# Altium footprint library Header2.PcbLib: 108 footprints (part 6 of 7)
Each footprint in its own frame and in the unit in brackets; x right, y up, seen from the top. Pads: shape width x height; smd on the part's side, far side on the other; paste and mask are expansions set on the pad; w line width, h text height; cw(c..) or ccw(c..) is an arc to the next point about the centre after c.
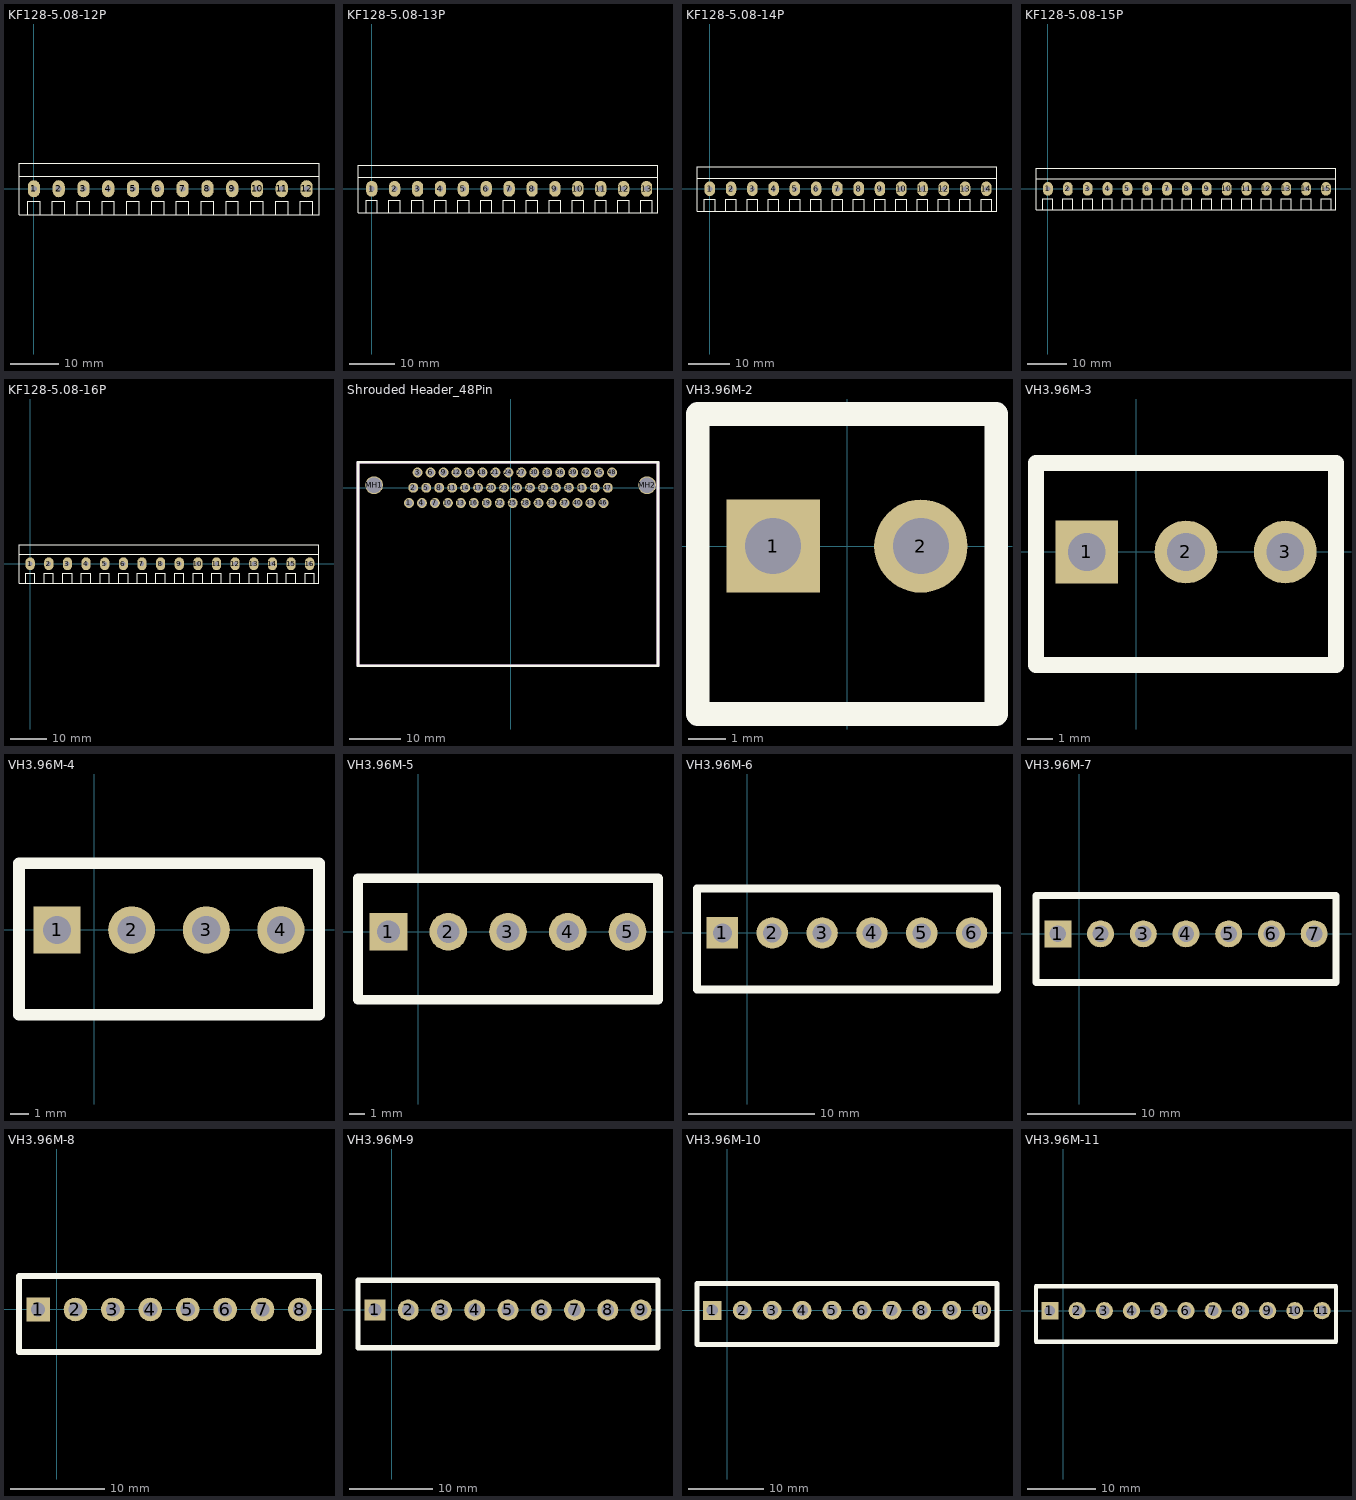
[diagram p5: the footprints below, top view; thin cyan lines are the x and y axes]

## KF128-5.08-12P [mm] "ÂÝ¶¤Ê½½ÓÏß¶Ë×Ó£¬½Å¾à5.08mm"
pads (12):
  oval 2.5x3.5 hole 1.2: 1(0,0) 2(5.08,0) 3(10.16,0) 4(15.24,0) 5(20.32,0) 6(25.4,0) 7(30.48,0) 8(35.56,0) 9(40.64,0) 10(45.72,0) 11(50.8,0) 12(55.88,0)
Top Overlay:
  lines w0.254: -3.048,2.54 58.42,2.54 ; -1.27,-5.309 -1.27,-2.54 1.27,-2.54 1.27,-5.309 ; 3.81,-5.309 3.81,-2.54 6.35,-2.54 6.35,-5.309 ; 8.89,-5.309 8.89,-2.54 11.43,-2.54 11.43,-5.309 ; 13.97,-5.309 13.97,-2.54 16.51,-2.54 16.51,-5.309 ; 19.05,-5.309 19.05,-2.54 21.59,-2.54 21.59,-5.309 ; 24.13,-5.309 24.13,-2.54 26.67,-2.54 26.67,-5.309 ; 29.21,-5.309 29.21,-2.54 31.75,-2.54 31.75,-5.309 ; 34.29,-5.309 34.29,-2.54 36.83,-2.54 36.83,-5.309 ; 39.37,-5.309 39.37,-2.54 41.91,-2.54 41.91,-5.309 ; 44.45,-5.309 44.45,-2.54 46.99,-2.54 46.99,-5.309 ; 49.53,-5.309 49.53,-2.54 52.07,-2.54 52.07,-5.309 ; 54.61,-5.309 54.61,-2.54 57.15,-2.54 57.15,-5.309 ; -3.048,-5.309 -3.048,5.207 58.42,5.207 58.42,-5.309 -3.048,-5.309
3D body "KF128-5.08-.STEP": height 14.15, standoff -3.95, extent -3.048,-5.377 2.532,5.123
3D body "KF128-5.08-.STEP": height 14.15, standoff -3.95, extent 2.032,-5.377 7.612,5.123
3D body "KF128-5.08-.STEP": height 14.15, standoff -3.95, extent 7.112,-5.377 12.692,5.123
3D body "KF128-5.08-.STEP": height 14.15, standoff -3.95, extent 22.352,-5.377 27.932,5.123
3D body "KF128-5.08-.STEP": height 14.15, standoff -3.95, extent 17.272,-5.377 22.852,5.123
3D body "KF128-5.08-.STEP": height 14.15, standoff -3.95, extent 12.192,-5.377 17.772,5.123
3D body "KF128-5.08-.STEP": height 14.15, standoff -3.95, extent 37.592,-5.377 43.172,5.123
3D body "KF128-5.08-.STEP": height 14.15, standoff -3.95, extent 32.512,-5.377 38.092,5.123
3D body "KF128-5.08-.STEP": height 14.15, standoff -3.95, extent 27.432,-5.377 33.012,5.123
3D body "KF128-5.08-.STEP": height 14.15, standoff -3.95, extent 52.832,-5.377 58.412,5.123
3D body "KF128-5.08-.STEP": height 14.15, standoff -3.95, extent 47.752,-5.377 53.332,5.123
3D body "KF128-5.08-.STEP": height 14.15, standoff -3.95, extent 42.672,-5.377 48.252,5.123

## KF128-5.08-13P [mm] "ÂÝ¶¤Ê½½ÓÏß¶Ë×Ó£¬½Å¾à5.08mm"
pads (13):
  oval 2.5x3.5 hole 1.2: 1(0,0) 2(5.08,0) 3(10.16,0) 4(15.24,0) 5(20.32,0) 6(25.4,0) 7(30.48,0) 8(35.56,0) 9(40.64,0) 10(45.72,0) 11(50.8,0) 12(55.88,0) 13(60.96,0)
Top Overlay:
  lines w0.254: -3.048,2.54 63.5,2.54 ; -1.27,-5.309 -1.27,-2.54 1.27,-2.54 1.27,-5.309 ; 3.81,-5.309 3.81,-2.54 6.35,-2.54 6.35,-5.309 ; 8.89,-5.309 8.89,-2.54 11.43,-2.54 11.43,-5.309 ; 13.97,-5.309 13.97,-2.54 16.51,-2.54 16.51,-5.309 ; 19.05,-5.309 19.05,-2.54 21.59,-2.54 21.59,-5.309 ; 24.13,-5.309 24.13,-2.54 26.67,-2.54 26.67,-5.309 ; 29.21,-5.309 29.21,-2.54 31.75,-2.54 31.75,-5.309 ; 34.29,-5.309 34.29,-2.54 36.83,-2.54 36.83,-5.309 ; 39.37,-5.309 39.37,-2.54 41.91,-2.54 41.91,-5.309 ; 44.45,-5.309 44.45,-2.54 46.99,-2.54 46.99,-5.309 ; 49.53,-5.309 49.53,-2.54 52.07,-2.54 52.07,-5.309 ; 54.61,-5.309 54.61,-2.54 57.15,-2.54 57.15,-5.309 ; 59.69,-5.309 59.69,-2.54 62.23,-2.54 62.23,-5.309 ; -3.048,-5.309 63.5,-5.309 63.5,5.207 -3.048,5.207 -3.048,-5.309
3D body "KF128-5.08-.STEP": height 14.15, standoff -3.95, extent 57.912,-5.377 63.492,5.123
3D body "KF128-5.08-.STEP": height 14.15, standoff -3.95, extent 42.672,-5.377 48.252,5.123
3D body "KF128-5.08-.STEP": height 14.15, standoff -3.95, extent 47.752,-5.377 53.332,5.123
3D body "KF128-5.08-.STEP": height 14.15, standoff -3.95, extent 52.832,-5.377 58.412,5.123
3D body "KF128-5.08-.STEP": height 14.15, standoff -3.95, extent 27.432,-5.377 33.012,5.123
3D body "KF128-5.08-.STEP": height 14.15, standoff -3.95, extent 32.512,-5.377 38.092,5.123
3D body "KF128-5.08-.STEP": height 14.15, standoff -3.95, extent 37.592,-5.377 43.172,5.123
3D body "KF128-5.08-.STEP": height 14.15, standoff -3.95, extent 12.192,-5.377 17.772,5.123
3D body "KF128-5.08-.STEP": height 14.15, standoff -3.95, extent 17.272,-5.377 22.852,5.123
3D body "KF128-5.08-.STEP": height 14.15, standoff -3.95, extent 22.352,-5.377 27.932,5.123
3D body "KF128-5.08-.STEP": height 14.15, standoff -3.95, extent 7.112,-5.377 12.692,5.123
3D body "KF128-5.08-.STEP": height 14.15, standoff -3.95, extent 2.032,-5.377 7.612,5.123
3D body "KF128-5.08-.STEP": height 14.15, standoff -3.95, extent -3.048,-5.377 2.532,5.123

## KF128-5.08-14P [mm] "ÂÝ¶¤Ê½½ÓÏß¶Ë×Ó£¬½Å¾à5.08mm"
pads (14):
  oval 2.5x3.5 hole 1.2: 1(0,0) 2(5.08,0) 3(10.16,0) 4(15.24,0) 5(20.32,0) 6(25.4,0) 7(30.48,0) 8(35.56,0) 9(40.64,0) 10(45.72,0) 11(50.8,0) 12(55.88,0) 13(60.96,0) 14(66.04,0)
Top Overlay:
  lines w0.254: -3.048,2.54 68.58,2.54 ; -1.27,-5.309 -1.27,-2.54 1.27,-2.54 1.27,-5.309 ; 3.81,-5.309 3.81,-2.54 6.35,-2.54 6.35,-5.309 ; 8.89,-5.309 8.89,-2.54 11.43,-2.54 11.43,-5.309 ; 13.97,-5.309 13.97,-2.54 16.51,-2.54 16.51,-5.309 ; 19.05,-5.309 19.05,-2.54 21.59,-2.54 21.59,-5.309 ; 24.13,-5.309 24.13,-2.54 26.67,-2.54 26.67,-5.309 ; 29.21,-5.309 29.21,-2.54 31.75,-2.54 31.75,-5.309 ; 34.29,-5.309 34.29,-2.54 36.83,-2.54 36.83,-5.309 ; 39.37,-5.309 39.37,-2.54 41.91,-2.54 41.91,-5.309 ; 44.45,-5.309 44.45,-2.54 46.99,-2.54 46.99,-5.309 ; 49.53,-5.309 49.53,-2.54 52.07,-2.54 52.07,-5.309 ; 54.61,-5.309 54.61,-2.54 57.15,-2.54 57.15,-5.309 ; 59.69,-5.309 59.69,-2.54 62.23,-2.54 62.23,-5.309 ; 64.77,-5.309 64.77,-2.54 67.31,-2.54 67.31,-5.309 ; -3.048,-5.309 68.58,-5.309 68.58,5.207 -3.048,5.207 -3.048,-5.309
3D body "KF128-5.08-.STEP": height 14.15, standoff -3.95, extent -3.048,-5.377 2.532,5.123
3D body "KF128-5.08-.STEP": height 14.15, standoff -3.95, extent 2.032,-5.377 7.612,5.123
3D body "KF128-5.08-.STEP": height 14.15, standoff -3.95, extent 7.112,-5.377 12.692,5.123
3D body "KF128-5.08-.STEP": height 14.15, standoff -3.95, extent 22.352,-5.377 27.932,5.123
3D body "KF128-5.08-.STEP": height 14.15, standoff -3.95, extent 17.272,-5.377 22.852,5.123
3D body "KF128-5.08-.STEP": height 14.15, standoff -3.95, extent 12.192,-5.377 17.772,5.123
3D body "KF128-5.08-.STEP": height 14.15, standoff -3.95, extent 37.592,-5.377 43.172,5.123
3D body "KF128-5.08-.STEP": height 14.15, standoff -3.95, extent 32.512,-5.377 38.092,5.123
3D body "KF128-5.08-.STEP": height 14.15, standoff -3.95, extent 27.432,-5.377 33.012,5.123
3D body "KF128-5.08-.STEP": height 14.15, standoff -3.95, extent 52.832,-5.377 58.412,5.123
3D body "KF128-5.08-.STEP": height 14.15, standoff -3.95, extent 47.752,-5.377 53.332,5.123
3D body "KF128-5.08-.STEP": height 14.15, standoff -3.95, extent 42.672,-5.377 48.252,5.123
3D body "KF128-5.08-.STEP": height 14.15, standoff -3.95, extent 62.992,-5.377 68.572,5.123
3D body "KF128-5.08-.STEP": height 14.15, standoff -3.95, extent 57.912,-5.377 63.492,5.123

## KF128-5.08-15P [mm] "ÂÝ¶¤Ê½½ÓÏß¶Ë×Ó£¬½Å¾à5.08mm"
pads (15):
  oval 2.5x3.5 hole 1.2: 1(0,0) 2(5.08,0) 3(10.16,0) 4(15.24,0) 5(20.32,0) 6(25.4,0) 7(30.48,0) 8(35.56,0) 9(40.64,0) 10(45.72,0) 11(50.8,0) 12(55.88,0) 13(60.96,0) 14(66.04,0) 15(71.12,0)
Top Overlay:
  lines w0.254: -3.048,2.54 73.66,2.54 ; -1.27,-5.309 -1.27,-2.54 1.27,-2.54 1.27,-5.309 ; 3.81,-5.309 3.81,-2.54 6.35,-2.54 6.35,-5.309 ; 8.89,-5.309 8.89,-2.54 11.43,-2.54 11.43,-5.309 ; 13.97,-5.309 13.97,-2.54 16.51,-2.54 16.51,-5.309 ; 19.05,-5.309 19.05,-2.54 21.59,-2.54 21.59,-5.309 ; 24.13,-5.309 24.13,-2.54 26.67,-2.54 26.67,-5.309 ; 29.21,-5.309 29.21,-2.54 31.75,-2.54 31.75,-5.309 ; 34.29,-5.309 34.29,-2.54 36.83,-2.54 36.83,-5.309 ; 39.37,-5.309 39.37,-2.54 41.91,-2.54 41.91,-5.309 ; 44.45,-5.309 44.45,-2.54 46.99,-2.54 46.99,-5.309 ; 49.53,-5.309 49.53,-2.54 52.07,-2.54 52.07,-5.309 ; 54.61,-5.309 54.61,-2.54 57.15,-2.54 57.15,-5.309 ; 59.69,-5.309 59.69,-2.54 62.23,-2.54 62.23,-5.309 ; 64.77,-5.309 64.77,-2.54 67.31,-2.54 67.31,-5.309 ; 69.85,-5.309 69.85,-2.54 72.39,-2.54 72.39,-5.309 ; -3.048,-5.309 -3.048,5.207 73.66,5.207 73.66,-5.309 -3.048,-5.309
3D body "KF128-5.08-.STEP": height 14.15, standoff -3.95, extent -3.048,-5.377 2.532,5.123
3D body "KF128-5.08-.STEP": height 14.15, standoff -3.95, extent 2.032,-5.377 7.612,5.123
3D body "KF128-5.08-.STEP": height 14.15, standoff -3.95, extent 7.112,-5.377 12.692,5.123
3D body "KF128-5.08-.STEP": height 14.15, standoff -3.95, extent 22.352,-5.377 27.932,5.123
3D body "KF128-5.08-.STEP": height 14.15, standoff -3.95, extent 17.272,-5.377 22.852,5.123
3D body "KF128-5.08-.STEP": height 14.15, standoff -3.95, extent 12.192,-5.377 17.772,5.123
3D body "KF128-5.08-.STEP": height 14.15, standoff -3.95, extent 37.592,-5.377 43.172,5.123
3D body "KF128-5.08-.STEP": height 14.15, standoff -3.95, extent 32.512,-5.377 38.092,5.123
3D body "KF128-5.08-.STEP": height 14.15, standoff -3.95, extent 27.432,-5.377 33.012,5.123
3D body "KF128-5.08-.STEP": height 14.15, standoff -3.95, extent 52.832,-5.377 58.412,5.123
3D body "KF128-5.08-.STEP": height 14.15, standoff -3.95, extent 47.752,-5.377 53.332,5.123
3D body "KF128-5.08-.STEP": height 14.15, standoff -3.95, extent 42.672,-5.377 48.252,5.123
3D body "KF128-5.08-.STEP": height 14.15, standoff -3.95, extent 68.072,-5.377 73.652,5.123
3D body "KF128-5.08-.STEP": height 14.15, standoff -3.95, extent 62.992,-5.377 68.572,5.123
3D body "KF128-5.08-.STEP": height 14.15, standoff -3.95, extent 57.912,-5.377 63.492,5.123

## KF128-5.08-16P [mm] "ÂÝ¶¤Ê½½ÓÏß¶Ë×Ó£¬½Å¾à5.08mm"
pads (16):
  oval 2.5x3.5 hole 1.2: 1(0,0) 2(5.08,0) 3(10.16,0) 4(15.24,0) 5(20.32,0) 6(25.4,0) 7(30.48,0) 8(35.56,0) 9(40.64,0) 10(45.72,0) 11(50.8,0) 12(55.88,0) 13(60.96,0) 14(66.04,0) 15(71.12,0) 16(76.2,0)
Top Overlay:
  lines w0.254: -3.048,2.54 78.74,2.54 ; -1.27,-5.309 -1.27,-2.54 1.27,-2.54 1.27,-5.309 ; 3.81,-5.309 3.81,-2.54 6.35,-2.54 6.35,-5.309 ; 8.89,-5.309 8.89,-2.54 11.43,-2.54 11.43,-5.309 ; 13.97,-5.309 13.97,-2.54 16.51,-2.54 16.51,-5.309 ; 19.05,-5.309 19.05,-2.54 21.59,-2.54 21.59,-5.309 ; 24.13,-5.309 24.13,-2.54 26.67,-2.54 26.67,-5.309 ; 29.21,-5.309 29.21,-2.54 31.75,-2.54 31.75,-5.309 ; 34.29,-5.309 34.29,-2.54 36.83,-2.54 36.83,-5.309 ; 39.37,-5.309 39.37,-2.54 41.91,-2.54 41.91,-5.309 ; 44.45,-5.309 44.45,-2.54 46.99,-2.54 46.99,-5.309 ; 49.53,-5.309 49.53,-2.54 52.07,-2.54 52.07,-5.309 ; 54.61,-5.309 54.61,-2.54 57.15,-2.54 57.15,-5.309 ; 59.69,-5.309 59.69,-2.54 62.23,-2.54 62.23,-5.309 ; 64.77,-5.309 64.77,-2.54 67.31,-2.54 67.31,-5.309 ; 69.85,-5.309 69.85,-2.54 72.39,-2.54 72.39,-5.309 ; 74.93,-5.309 74.93,-2.54 77.47,-2.54 77.47,-5.309 ; -3.048,-5.309 -3.048,5.207 78.74,5.207 78.74,-5.309 -3.048,-5.309
3D body "KF128-5.08-.STEP": height 14.15, standoff -3.95, extent -3.048,-5.377 2.532,5.123
3D body "KF128-5.08-.STEP": height 14.15, standoff -3.95, extent 2.032,-5.377 7.612,5.123
3D body "KF128-5.08-.STEP": height 14.15, standoff -3.95, extent 7.112,-5.377 12.692,5.123
3D body "KF128-5.08-.STEP": height 14.15, standoff -3.95, extent 22.352,-5.377 27.932,5.123
3D body "KF128-5.08-.STEP": height 14.15, standoff -3.95, extent 17.272,-5.377 22.852,5.123
3D body "KF128-5.08-.STEP": height 14.15, standoff -3.95, extent 12.192,-5.377 17.772,5.123
3D body "KF128-5.08-.STEP": height 14.15, standoff -3.95, extent 37.592,-5.377 43.172,5.123
3D body "KF128-5.08-.STEP": height 14.15, standoff -3.95, extent 32.512,-5.377 38.092,5.123
3D body "KF128-5.08-.STEP": height 14.15, standoff -3.95, extent 27.432,-5.377 33.012,5.123
3D body "KF128-5.08-.STEP": height 14.15, standoff -3.95, extent 52.832,-5.377 58.412,5.123
3D body "KF128-5.08-.STEP": height 14.15, standoff -3.95, extent 47.752,-5.377 53.332,5.123
3D body "KF128-5.08-.STEP": height 14.15, standoff -3.95, extent 42.672,-5.377 48.252,5.123
3D body "KF128-5.08-.STEP": height 14.15, standoff -3.95, extent 68.072,-5.377 73.652,5.123
3D body "KF128-5.08-.STEP": height 14.15, standoff -3.95, extent 62.992,-5.377 68.572,5.123
3D body "KF128-5.08-.STEP": height 14.15, standoff -3.95, extent 57.912,-5.377 63.492,5.123
3D body "KF128-5.08-.STEP": height 14.15, standoff -3.95, extent 73.152,-5.377 78.732,5.123

## Shrouded Header_48Pin [mm]
height 1.2
pads (50):
  round 1.95 hole 1.3: 1(-19.975,-3) 2(-19.125,0) 3(-18.275,3) 4(-17.425,-3) 5(-16.575,0) 6(-15.725,3) 7(-14.875,-3) 8(-14.025,0) 9(-13.175,3) 10(-12.325,-3) 11(-11.475,0) 12(-10.625,3) 13(-9.775,-3) 14(-8.925,0) 15(-8.075,3) 16(-7.225,-3) 17(-6.375,0) 18(-5.525,3) 19(-4.675,-3) 20(-3.825,0) 21(-2.975,3) 22(-2.125,-3) 23(-1.275,0) 24(-0.425,3) 25(0.425,-3) 26(1.275,0) 27(2.125,3) 28(2.975,-3) 29(3.825,0) 30(4.675,3) 31(5.525,-3) 32(6.375,0) 33(7.225,3) 34(8.075,-3) 35(8.925,0) 36(9.775,3) 37(10.625,-3) 38(11.475,0) 39(12.325,3) 40(13.175,-3) 41(14.025,0) 42(14.875,3) 43(15.725,-3) 44(16.575,0) 45(17.425,3) 46(18.275,-3) 47(19.125,0) 48(19.975,3)
  round 3.5 hole 3.1: MH1(-26.85,0.5) MH2(26.85,0.5)
Top Overlay:
  lines w0.5: -30,-35 29,-35 29,4 29,5 -30,5 -30,-35
Mechanical 1:
  lines w0.5: -30,-35 -30,5 29,5 29,-35 -30,-35
  text ".Designator" at -8,-14.708 h2
3D body "S48B-ZROK-2A-R.stp": height 21.3, standoff -3.2, extent -28.5,-33.5 28.5,3.4

## VH3.96M-2 [mm]
pads (2):
  rect 2.5x2.5 hole 1.5: 1(-1.98,0)
  round 2.5 hole 1.5: 2(1.98,0)
Top Overlay:
  lines w0.635: 3.96,3.5 4,3.54 ; 4,3.54 -4,3.54 -4,-4.5 4,-4.5 4,3.54
3D body "VH3.96M-2.STEP": height 10.26, standoff -3.19, extent -4.08,-4.49 3.96,3.88

## VH3.96M-3 [mm]
pads (3):
  rect 2.5x2.5 hole 1.5: 1(-1.98,0)
  round 2.5 hole 1.5: 2(1.98,0) 3(5.94,0)
Top Overlay:
  lines w0.635: -4,-4.5 7.96,-4.5 7.96,3.54 -4,3.54 -4,-4.5
3D body "VH3.96M-3.STEP": height 10.26, standoff -3.19, extent -4.08,-4.49 7.92,3.88

## VH3.96M-4 [mm]
pads (4):
  rect 2.5x2.5 hole 1.5: 1(-1.98,0)
  round 2.5 hole 1.5: 2(1.98,0) 3(5.94,0) 4(9.9,0)
Top Overlay:
  lines w0.635: -4,-4.5 -4,3.54 11.92,3.54 11.92,-4.5 -4,-4.5
3D body "VH3.96M-4.STEP": height 10.26, standoff -3.19, extent -4.08,-4.49 11.88,3.88

## VH3.96M-5 [mm]
pads (5):
  rect 2.5x2.5 hole 1.5: 1(-1.98,0)
  round 2.5 hole 1.5: 2(1.98,0) 3(5.94,0) 4(9.9,0) 5(13.86,0)
Top Overlay:
  lines w0.635: -4,-4.5 15.88,-4.5 15.88,3.54 -4,3.54 -4,-4.5
3D body "VH3.96M-5.STEP": height 10.26, standoff -3.19, extent -4.08,-4.49 15.84,3.88

## VH3.96M-6 [mm]
pads (6):
  rect 2.5x2.5 hole 1.5: 1(-1.98,0)
  round 2.5 hole 1.5: 2(1.98,0) 3(5.94,0) 4(9.9,0) 5(13.86,0) 6(17.82,0)
Top Overlay:
  lines w0.635: -4,-4.5 19.84,-4.5 19.84,3.54 -4,3.54 -4,-4.5
3D body "VH3.96M-6.STEP": height 10.26, standoff -3.19, extent -4.08,-4.49 19.8,3.88

## VH3.96M-7 [mm]
pads (7):
  rect 2.5x2.5 hole 1.5: 1(-1.98,0)
  round 2.5 hole 1.5: 2(1.98,0) 3(5.94,0) 4(9.9,0) 5(13.86,0) 6(17.82,0) 7(21.78,0)
Top Overlay:
  lines w0.635: -4,-4.5 23.8,-4.5 23.8,3.54 -4,3.54 -4,-4.5
3D body "VH3.96M-7.STEP": height 10.26, standoff -3.19, extent -4.08,-4.49 23.76,3.88

## VH3.96M-8 [mm]
pads (8):
  rect 2.5x2.5 hole 1.5: 1(-1.98,0)
  round 2.5 hole 1.5: 2(1.98,0) 3(5.94,0) 4(9.9,0) 5(13.86,0) 6(17.82,0) 7(21.78,0) 8(25.74,0)
Top Overlay:
  lines w0.635: -4,-4.5 -4,3.54 27.76,3.54 27.76,-4.5 -4,-4.5
3D body "VH3.96M-8.STEP": height 10.26, standoff -3.19, extent -4.08,-4.49 27.72,3.88

## VH3.96M-9 [mm]
pads (9):
  rect 2.5x2.5 hole 1.5: 1(-1.98,0)
  round 2.5 hole 1.5: 2(1.98,0) 3(5.94,0) 4(9.9,0) 5(13.86,0) 6(17.82,0) 7(21.78,0) 8(25.74,0) 9(29.7,0)
Top Overlay:
  lines w0.635: -4,-4.5 -4,3.54 31.72,3.54 31.72,-4.5 -4,-4.5
3D body "VH3.96M-9.STEP": height 10.26, standoff -3.19, extent -4.08,-4.49 31.68,3.88

## VH3.96M-10 [mm]
pads (10):
  rect 2.5x2.5 hole 1.5: 1(-1.98,0)
  round 2.5 hole 1.5: 2(1.98,0) 3(5.94,0) 4(9.9,0) 5(13.86,0) 6(17.82,0) 7(21.78,0) 8(25.74,0) 9(29.7,0) 10(33.66,0)
Top Overlay:
  lines w0.635: -4,-4.5 35.68,-4.5 35.68,3.54 -4,3.54 -4,-4.5
3D body "VH3.96M-10.STEP": height 10.26, standoff -3.19, extent -4.08,-4.49 35.64,3.88

## VH3.96M-11 [mm]
pads (11):
  rect 2.5x2.5 hole 1.5: 1(-1.98,0)
  round 2.5 hole 1.5: 2(1.98,0) 3(5.94,0) 4(9.9,0) 5(13.86,0) 6(17.82,0) 7(21.78,0) 8(25.74,0) 9(29.7,0) 10(33.66,0) 11(37.62,0)
Top Overlay:
  lines w0.635: -4,-4.5 -4,3.54 39.64,3.54 39.64,-4.5 -4,-4.5
3D body "VH3.96M-11.STEP": height 10.26, standoff -3.19, extent -4.08,-4.49 39.6,3.88